# Altium integrated library VIETTIEN_2.IntLib: 110 symbols (part 5 of 5)

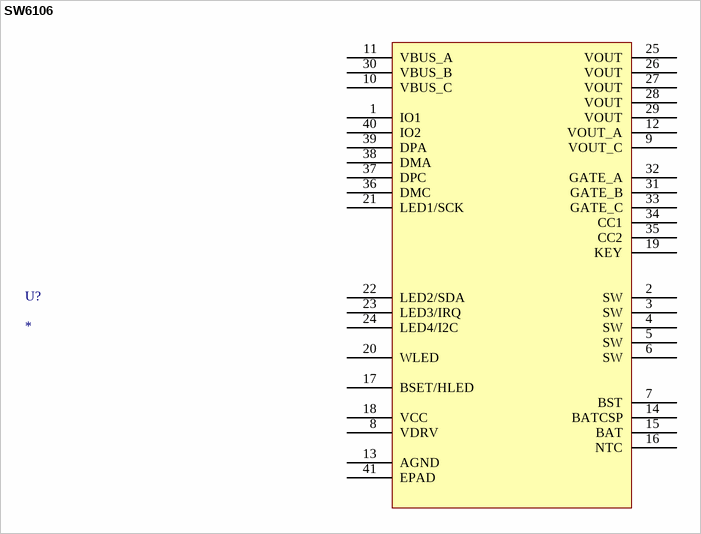
[diagram p92: symbol SW6106]

## SW6106
designator U?
SW6106 – Bidirectional Fast Charging Power Bank Management IC, 5V Output, QFN-40, 6×6mm.
footprint QFN50P600X600X80-41N (QFN, 40-Leads, Body 6.00x6.00mm, Pitch 0.50mm, Thermal Pad 4.20x4.20mm, IPC Medium Density)
pins: 1 IO1, 2 SW, 3 SW, 4 SW, 5 SW, 6 SW, 7 BST, 8 VDRV, 9 VOUT_C, 10 VBUS_C, 11 VBUS_A, 12 VOUT_A, 13 AGND, 14 BATCSP, 15 BAT, 16 NTC, 17 BSET/HLED, 18 VCC, 19 KEY, 20 WLED, 21 LED1/SCK, 22 LED2/SDA, 23 LED3/IRQ, 24 LED4/I2C, 25 VOUT, 26 VOUT, 27 VOUT, 28 VOUT, 29 VOUT, 30 VBUS_B, 31 GATE_B, 32 GATE_A, 33 GATE_C, 34 CC1, 35 CC2, 36 DMC, 37 DPC, 38 DMA, 39 DPA, 40 IO2, 41 EPAD


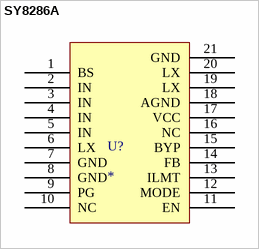
[diagram p93: symbol SY8286A]

## SY8286A
designator U?
High-efficiency synchronous DC-DC step-down converter with integrated MOSFETs.
footprint QFN45P300X300X90-21N (QFN, 20-Leads, Body 3.00x3.00mm, Pitch 0.45mm, Thermal Pad 1.00x1.00mm, IPC Medium Density)
pins: 1 BS, 2 IN, 3 IN, 4 IN, 5 IN, 6 LX, 7 GND, 8 GND, 9 PG, 10 NC, 11 EN, 12 MODE, 13 ILMT, 14 FB, 15 BYP, 16 NC, 17 VCC, 18 AGND, 19 LX, 20 LX, 21 GND


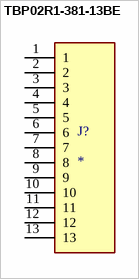
[diagram p94: symbol TBP02R1-381-13BE]

## TBP02R1-381-13BE
designator J?
2~24 Poles, Pluggable,Receptacle, Horizontal, 3.81 Pitch, Terminal Block Connector; MANUFACTURER: Same Sky; MPN: TBP02R1-381-13BE; DATASHEET_URL: https://s3.amazonaws.com/snapeda/datasheet/TBP02R1-381-13BE_CUI_Devices.pdf; STANDARD: Manufacturer Recommendations; Value: *; SOURCE_URL: https://www.snapeda.com/parts/TBP02R1-381-13BE/Same+Sky/view-part/
footprint CUI_TBP02R1-381-13BE
pins: 1, 2, 3, 4, 5, 6, 7, 8, 9, 10, 11, 12, 13


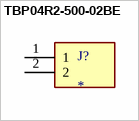
[diagram p95: symbol TBP04R2-500-02BE]

## TBP04R2-500-02BE
designator J?
2~24 Poles, Pluggable, Receptacle, Vertical, 5.0 Pitch, Terminal Block Connector; MF: Same Sky; MP: TBP04R2-500-02BE; SnapEDA_Link: https://www.snapeda.com/parts/TBP04R2-500-02BE/Same+Sky/view-part/?ref=snap; Package: None; Value: *; Check_prices: https://www.snapeda.com/parts/TBP04R2-500-02BE/Same+Sky/view-part/?ref=eda
footprint CUI_TBP04R2-500-02BE
pins: 1, 2


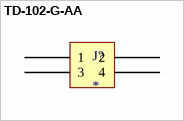
[diagram p96: symbol TD-102-G-AA]

## TD-102-G-AA
designator J?
4-Pin (2x2) Double-Row Vertical Male Header, 2.54mm Pitch, THT, Gold-Plated
footprint PCBComponent
pins: 1, 2, 3, 4


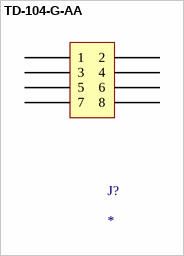
[diagram p97: symbol TD-104-G-AA]

## TD-104-G-AA
designator J?
8-Pin (2x4) Double-Row Vertical Male Header, 2.54mm Pitch, THT, Gold-Plated
footprint PCBComponent_1
pins: 1, 2, 3, 4, 5, 6, 7, 8


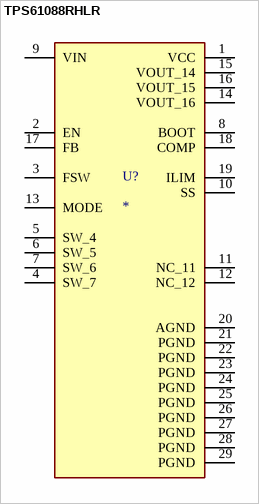
[diagram p98: symbol TPS61088RHLR]

## TPS61088RHLR
designator U?
MP: TPS61088RHLR; Availability: Unavailable; Value: *; Package: None; Price: None
footprint IC_TPS61088RHLR
pins: 1 VCC, 2 EN, 3 FSW, 4 SW_7, 5 SW_4, 6 SW_5, 7 SW_6, 8 BOOT, 9 VIN, 10 SS, 11 NC_11, 12 NC_12, 13 MODE, 14 VOUT_16, 15 VOUT_14, 16 VOUT_15, 17 FB, 18 COMP, 19 ILIM, 20 AGND (power), 21 PGND (power), 22 PGND (power), 23 PGND (power), 24 PGND (power), 25 PGND (power), 26 PGND (power), 27 PGND (power), 28 PGND (power), 29 PGND (power)


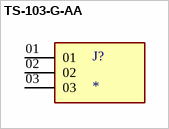
[diagram p99: symbol TS-103-G-AA]

## TS-103-G-AA
designator J?
Conn Unshrouded Header HDR 3 POS 2.54mm Solder ST Thru-Hole Bulk; MP: TS-103-G-AA; MF: Samtec; Price: None; Purchase-URL: https://pricing.snapeda.com/search/part/TS-103-G-AA/?ref=eda; Package: None; Check_prices: https://www.snapeda.com/parts/TS-103-G-AA/Samtec/view-part/?ref=eda; Value: *; Availability: In Stock; SnapEDA_Link: https://www.snapeda.com/parts/TS-103-G-AA/Samtec/view-part/?ref=snap
footprint SAMTEC_TS-103-G-AA
pins: 01, 02, 03


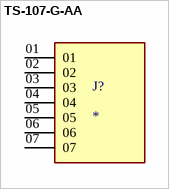
[diagram p100: symbol TS-107-G-AA]

## TS-107-G-AA
designator J?
Conn Unshrouded Header HDR 7 POS 2.54mm Solder ST Top Entry Thru-Hole Tube; MP: TS-107-G-AA; MF: Samtec Inc.; Value: *; Package: None; Check_prices: https://www.snapeda.com/parts/TS-107-G-AA/Samtec/view-part/4675875/?ref=eda; Purchase-URL: https://pricing.snapeda.com/search/part/TS-107-G-AA/?ref=eda; Price: None; SnapEDA_Link: https://www.snapeda.com/parts/TS-107-G-AA/Samtec/view-part/4675875/?ref=snap; Availability: In Stock
footprint SAMTEC_TS-107-G-AA
pins: 01, 02, 03, 04, 05, 06, 07


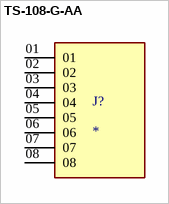
[diagram p101: symbol TS-108-G-AA]

## TS-108-G-AA
designator J?
Conn Unshrouded Header HDR 8 POS 2.54mm Solder ST Thru-Hole Tube; MF: Samtec; MP: TS-108-G-AA; Purchase-URL: https://pricing.snapeda.com/search/part/TS-108-G-AA/?ref=eda; SnapEDA_Link: https://www.snapeda.com/parts/TS-108-G-AA/Samtec/view-part/?ref=snap; Value: *; Check_prices: https://www.snapeda.com/parts/TS-108-G-AA/Samtec/view-part/?ref=eda; Availability: In Stock; Price: None; Package: None
footprint SAMTEC_TS-108-G-AA
pins: 01, 02, 03, 04, 05, 06, 07, 08


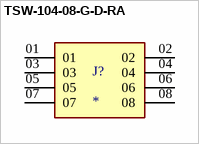
[diagram p102: symbol TSW-104-08-G-D-RA]

## TSW-104-08-G-D-RA
designator J?
MP: TSW-104-08-G-D-RA; MF: Samtec; Package: None; Value: *; Price: None; Availability: Unavailable
footprint SAMTEC_TSW-104-08-G-D-RA
pins: 01, 02, 03, 04, 05, 06, 07, 08


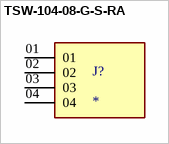
[diagram p103: symbol TSW-104-08-G-S-RA]

## TSW-104-08-G-S-RA
designator J?
MP: TSW-104-08-G-S-RA; MF: Samtec Inc.; Availability: Unavailable; Package: None; Value: *; Price: None
footprint SAMTEC_TSW-104-08-G-S-RA
pins: 01, 02, 03, 04


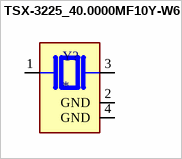
[diagram p104: symbol TSX-3225_40.0000MF10Y-W6]

## TSX-3225_40.0000MF10Y-W6
designator Y?
40 MHz Â±10ppm Crystal 12pF 40 Ohms 4-SMD, No Lead; MP: TSX-3225 40.0000MF10Y-W6; MF: EPSON; Check_prices: https://www.snapeda.com/parts/TSX-3225%2040.0000MF10Y-W6/EPSON/view-part/?ref=eda; Price: None; Purchase-URL: https://pricing.snapeda.com/search/part/TSX-3225 40.0000MF10Y-W6/?ref=eda; SnapEDA_Link: https://www.snapeda.com/parts/TSX-3225%2040.0000MF10Y-W6/EPSON/view-part/?ref=snap; Availability: In Stock; Package: NON STANDARD-4 EPSON; Value: *
footprint XTAL_TSX-3225_40.0000MF10Y-W6
pins: 1, 2 GND (power), 3 2, 4 GND (power)


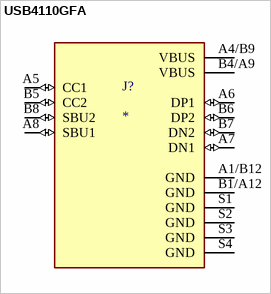
[diagram p105: symbol USB4110GFA]

## USB4110GFA
designator J?
USB-C (USB TYPE-C) USB 2.0 Receptacle Connector 24 (16+8 Dummy) Position Surface Mount, Right Angle; MF: Global Connector Technology; MP: USB4110GFA; SnapEDA_Link: https://www.snapeda.com/parts/USB4110GFA/Global+Connector+Technology/view-part/?ref=snap; Package: None; Value: *; Check_prices: https://www.snapeda.com/parts/USB4110GFA/Global+Connector+Technology/view-part/?ref=eda
footprint GCT_USB4110GFA
pins: A1/B12 GND (power), A4/B9 VBUS (power), A5 CC1 (io), A6 DP1 (io), A7 DN1 (io), A8 SBU1 (io), B1/A12 GND (power), B4/A9 VBUS (power), B5 CC2 (io), B6 DP2 (io), B7 DN2 (io), B8 SBU2 (io), S1 GND (power), S2 GND (power), S3 GND (power), S4 GND (power)


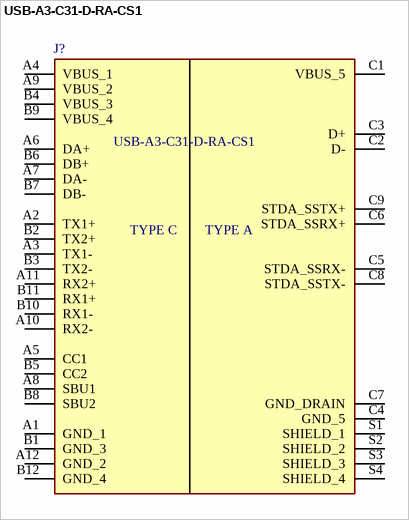
[diagram p106: symbol USB-A3-C31-D-RA-CS1]

## USB-A3-C31-D-RA-CS1
designator J?
Connector, USB TYPE-A 3.0 over TYPE-C 3.1, right angle, PCB, terminals; Manufacturer_Name: Adam Tech; Geometry.Height: 15.91mm; Manufacturer_Part_Number: USB-A3-C31-D-RA-CS1; Mouser Part Number: 737-USBA3C31DRACS1; Mouser Price/Stock: https://www.mouser.co.uk/ProductDetail/Adam-Tech/USB-A3-C31-D-RA-CS1?qs=HoCaDK9Nz5e7qYzkfwPXcA%3D%3D; Arrow Part Number: USB-A3-C31-D-RA-CS1; Arrow Price/Stock: https://www.arrow.com/en/products/usb-a3-c31-d-ra-cs1/adam-tech.html?utm_currency=USD&region=nac; Datasheet Link: https://app.adam-tech.com/products/download/data_sheet/195873/usb-a3-c31-d-ra-cs1-data-sheet.pdf
footprint USBA3C31DRACS1
pins: A1 GND_1, A2 TX1+, A3 TX1-, A4 VBUS_1, A5 CC1, A6 DA+, A7 DA-, A8 SBU1, A9 VBUS_2, A10 RX2-, A11 RX2+, A12 GND_2, B1 GND_3, B2 TX2+, B3 TX2-, B4 VBUS_3, B5 CC2, B6 DB+, B7 DB-, B8 SBU2, B9 VBUS_4, B10 RX1-, B11 RX1+, B12 GND_4, C1 VBUS_5, C2 D-, C3 D+, C4 GND_5, C5 STDA_SSRX-, C6 STDA_SSRX+, C7 GND_DRAIN, C8 STDA_SSTX-, C9 STDA_SSTX+, S1 SHIELD_1, S2 SHIELD_2, S3 SHIELD_3, S4 SHIELD_4
text: TYPE C; TYPE A


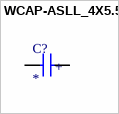
[diagram p107: symbol WCAP-ASLL_4X5.5]

## WCAP-ASLL_4X5.5
designator C?
CAP ALUM 10UF 20% 25V SMD; MF: WÃ¼rth Elektronik; MP: 865060440001; SnapEDA_Link: https://www.snapeda.com/parts/865060440001/W%25C3%25BCrth+Elektronik+Midcom/view-part/?ref=snap; Package: Radial WÃ¼rth Elektronik; Value: *; Check_prices: https://www.snapeda.com/parts/865060440001/W%25C3%25BCrth+Elektronik+Midcom/view-part/?ref=eda
footprint WCAP-ASLL_4X5.5(DXL)
pins: 1 POS, 2 NEG
text: +


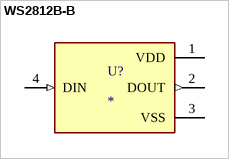
[diagram p108: symbol WS2812B-B]

## WS2812B-B
designator U?
Intelligent control LED integrated light source; MP: WS2812B-B; Availability: Unavailable; Price: None; Package: None; Value: *
footprint LED_WS2812B-B
pins: 1 VDD (power), 2 DOUT (out), 3 VSS (power), 4 DIN (in)


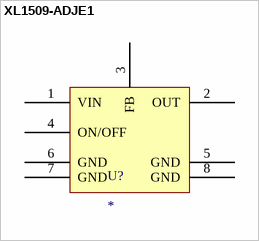
[diagram p109: symbol XL1509-ADJE1]

## XL1509-ADJE1
designator U?
2A 150KHz 40V Buck DC to DC Converter; MF: Texas Instruments; MP: LM358DR; SnapEDA_Link: https://www.snapeda.com/parts/LM358DR/Texas+Instruments/view-part/?ref=snap; Package: SOIC-8 Texas Instruments; Value: *; Check_prices: https://www.snapeda.com/parts/LM358DR/Texas+Instruments/view-part/?ref=eda
footprint SOIC127P599X175-8N
pins: 1 VIN, 2 OUT, 3 FB, 4 ON/OFF, 5 GND, 6 GND, 7 GND, 8 GND